# Altium footprint library smoke_ir_sensor.PcbLib: 1 footprints
Each footprint in its own frame and in the unit in brackets; x right, y up, seen from the top. Pads: shape width x height; smd on the part's side, far side on the other; paste and mask are expansions set on the pad; w line width, h text height; cw(c..) or ccw(c..) is an arc to the next point about the centre after c.
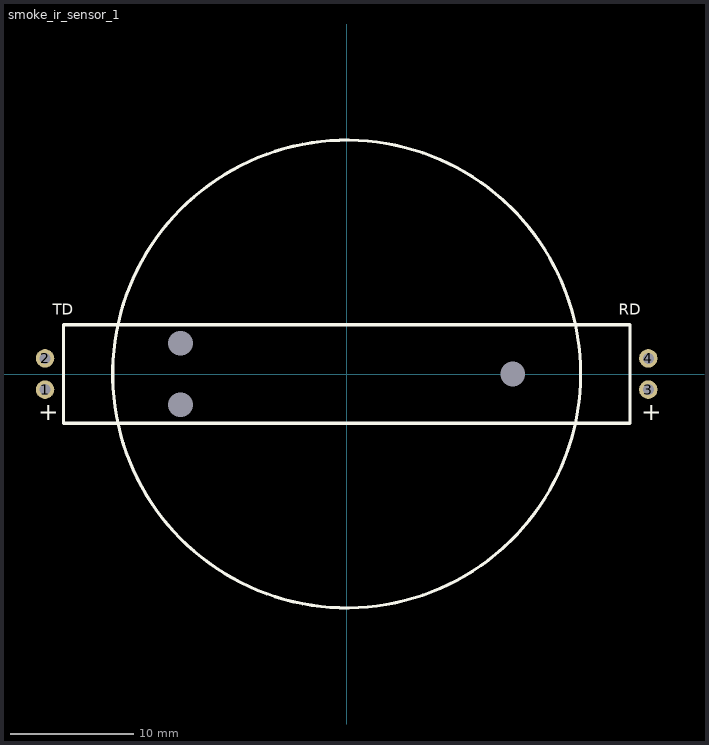
[diagram p0: the footprint, top view; thin cyan lines are the x and y axes]

## smoke_ir_sensor_1 [mm]
pads (7):
  round 0 hole 2 unplated: 0(-13.5,-2.5) 0(-13.5,2.5) 0(13.5,0)
  round 1.5 hole 0.9: 1(-24.5,-1.27) 2(-24.5,1.27) 3(24.5,-1.27) 4(24.5,1.27)
Top Overlay:
  circle w0.254: c0,0 r19
  lines w0.254: -23,-4 23,-4 23,4 -23,4 -23,-4
  text "TD" at -23.859,4.5 h1.52
  text "RD" at 22.1,4.5 h1.52
  text "+" at -25.06,-4.231 h2.5
  text "+" at 23.94,-4.231 h2.5